# Altium integrated library GY-521.IntLib: 1 symbol
Pins are listed as number, name and electrical type; pins without a type are passive.

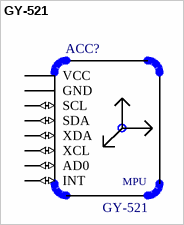
[diagram p0: symbol GY-521]

## GY-521
designator ACC?
/ Triple Axis Accelerometer Gyro Breakout /; MF: GODREAM FORDREAM CO., LIMITED; SnapEDA_Link: https://www.snapeda.com/parts/GY-521/GODREAM+FORDREAM+CO.%252C+LIMITED/view-part/?ref=snap; Package: Package; MP: GY-521; Check_prices: https://www.snapeda.com/parts/GY-521/GODREAM+FORDREAM+CO.%252C+LIMITED/view-part/?ref=eda; Value: *
footprint *GY-521_GY-521(Primary)
pins: AD0 (io), GND (power), INT (io), SCL (io), SDA (io), VCC (power), XCL (io), XDA (io)
text: MPU